# Altium footprint library AMPHENOL_10103594-0001LF.PcbLib: 1 footprints
Each footprint in its own frame and in the unit in brackets; x right, y up, seen from the top. Pads: shape width x height; smd on the part's side, far side on the other; paste and mask are expansions set on the pad; w line width, h text height; cw(c..) or ccw(c..) is an arc to the next point about the centre after c.
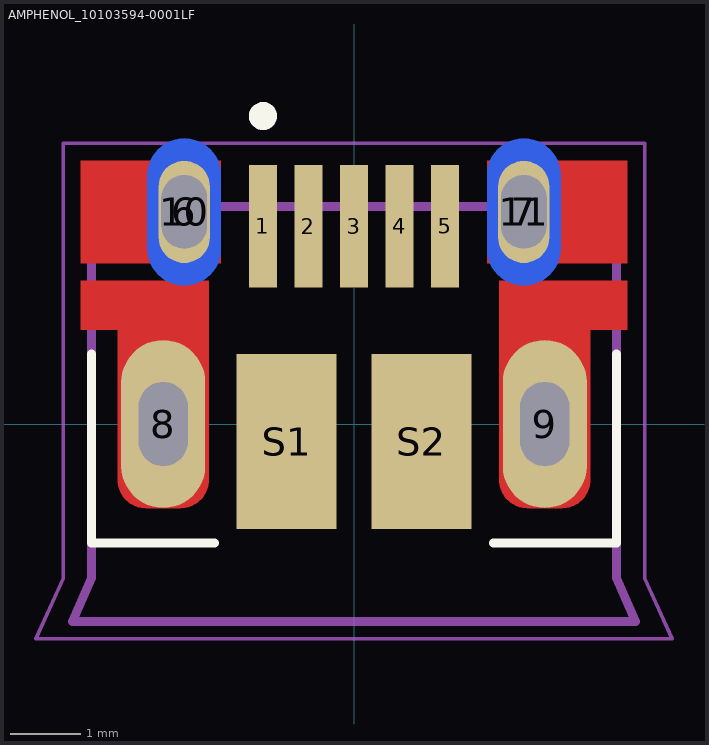
[diagram p0: the footprint, top view; thin cyan lines are the x and y axes]

## AMPHENOL_10103594-0001LF [mm]
height 2.99
pads (13):
  rect 0.4x1.75 smd: 1(-1.3,2.825) 2(-0.65,2.825) 3(0,2.825) 4(0.65,2.825) 5(1.3,2.825)
  oval 0.73x1.46 hole 0.65 slot 1.05 at 90 deg mask+0: 6(-2.425,3.03) 7(2.425,3.03)
  oval 1.2x2.4 hole 0.7 slot 1.2 at 90 deg: 8(-2.725,0) 9(2.725,0)
  oval 1.05x2.1 smd far side paste-2: 10(-2.425,3.03) 11(2.425,3.03)
  rect 1.425x2.5 smd: S1(-0.962,-0.25) S2(0.962,-0.25)
Top Layer:
  region: 3.9,1.35 3.375,1.35 3.375,-0.8 3.374,-0.821 3.373,-0.842 3.37,-0.863 3.366,-0.883 3.361,-0.904 3.355,-0.924 3.348,-0.943 3.34,-0.963 3.331,-0.982 3.321,-1 3.31,-1.018 3.299,-1.035 3.286,-1.052 3.272,-1.068 3.258,-1.083 3.243,-1.097 3.227,-1.111 3.21,-1.124 3.193,-1.135 3.175,-1.146 3.157,-1.156 3.138,-1.165 3.118,-1.173 3.099,-1.18 3.079,-1.186 3.058,-1.191 3.038,-1.195 3.017,-1.198 2.996,-1.199 2.975,-1.2 2.475,-1.2 2.454,-1.199 2.433,-1.198 2.412,-1.195 2.392,-1.191 2.371,-1.186 2.351,-1.18 2.332,-1.173 2.312,-1.165 2.293,-1.156 2.275,-1.146 2.257,-1.135 2.24,-1.124 2.223,-1.111 2.207,-1.097 2.192,-1.083 2.178,-1.068 2.164,-1.052 2.151,-1.035 2.14,-1.018 2.129,-1 2.119,-0.982 2.11,-0.963 2.102,-0.943 2.095,-0.924 2.089,-0.904 2.084,-0.883 2.08,-0.863 2.077,-0.842 2.076,-0.821 2.075,-0.8 2.075,2.05 3.9,2.05
  region: -2.075,-0.8 -2.076,-0.821 -2.077,-0.842 -2.08,-0.863 -2.084,-0.883 -2.089,-0.904 -2.095,-0.924 -2.102,-0.943 -2.11,-0.963 -2.119,-0.982 -2.129,-1 -2.14,-1.018 -2.151,-1.035 -2.164,-1.052 -2.178,-1.068 -2.192,-1.083 -2.207,-1.097 -2.223,-1.111 -2.24,-1.124 -2.257,-1.135 -2.275,-1.146 -2.293,-1.156 -2.312,-1.165 -2.332,-1.173 -2.351,-1.18 -2.371,-1.186 -2.392,-1.191 -2.412,-1.195 -2.433,-1.198 -2.454,-1.199 -2.475,-1.2 -2.975,-1.2 -2.996,-1.199 -3.017,-1.198 -3.038,-1.195 -3.058,-1.191 -3.079,-1.186 -3.099,-1.18 -3.118,-1.173 -3.138,-1.165 -3.157,-1.156 -3.175,-1.146 -3.193,-1.135 -3.21,-1.124 -3.227,-1.111 -3.243,-1.097 -3.258,-1.083 -3.272,-1.068 -3.286,-1.052 -3.299,-1.035 -3.31,-1.018 -3.321,-1 -3.331,-0.982 -3.34,-0.963 -3.348,-0.943 -3.355,-0.924 -3.361,-0.904 -3.366,-0.883 -3.37,-0.863 -3.373,-0.842 -3.374,-0.821 -3.375,-0.8 -3.375,1.35 -3.9,1.35 -3.9,2.05 -2.075,2.05
  region: 3.9,2.3 1.9,2.3 1.9,3.76 3.9,3.76
  region: -1.9,2.3 -3.9,2.3 -3.9,3.76 -1.9,3.76
Top Overlay:
  circle w0.2: c-1.3,4.4 r0.1
  lines w0.127: -3.75,1 -3.75,-1.7 -1.995,-1.7 ; 1.995,-1.7 3.75,-1.7 3.75,1
Top Solder:
  region: 4,1.25 3.475,1.25 3.475,-0.8 3.474,-0.826 3.472,-0.852 3.469,-0.878 3.464,-0.904 3.458,-0.929 3.451,-0.955 3.442,-0.979 3.432,-1.003 3.421,-1.027 3.408,-1.05 3.394,-1.072 3.38,-1.094 3.364,-1.115 3.347,-1.135 3.329,-1.154 3.31,-1.172 3.29,-1.189 3.269,-1.205 3.247,-1.219 3.225,-1.233 3.202,-1.246 3.178,-1.257 3.154,-1.267 3.13,-1.276 3.104,-1.283 3.079,-1.289 3.053,-1.294 3.027,-1.297 3.001,-1.299 2.975,-1.3 2.475,-1.3 2.449,-1.299 2.423,-1.297 2.397,-1.294 2.371,-1.289 2.346,-1.283 2.32,-1.276 2.296,-1.267 2.272,-1.257 2.248,-1.246 2.225,-1.233 2.203,-1.219 2.181,-1.205 2.16,-1.189 2.14,-1.172 2.121,-1.154 2.103,-1.135 2.086,-1.115 2.07,-1.094 2.056,-1.072 2.042,-1.05 2.029,-1.027 2.018,-1.003 2.008,-0.979 1.999,-0.955 1.992,-0.929 1.986,-0.904 1.981,-0.878 1.978,-0.852 1.976,-0.826 1.975,-0.8 1.975,2.15 4,2.15
  region: 4,2.2 1.8,2.2 1.8,3.86 4,3.86
  region: -1.8,2.2 -4,2.2 -4,3.86 -1.8,3.86
  region: -1.975,-0.8 -1.976,-0.826 -1.978,-0.852 -1.981,-0.878 -1.986,-0.904 -1.992,-0.929 -1.999,-0.955 -2.008,-0.979 -2.018,-1.003 -2.029,-1.027 -2.042,-1.05 -2.056,-1.072 -2.07,-1.094 -2.086,-1.115 -2.103,-1.135 -2.121,-1.154 -2.14,-1.172 -2.16,-1.189 -2.181,-1.205 -2.203,-1.219 -2.225,-1.233 -2.248,-1.246 -2.272,-1.257 -2.296,-1.267 -2.32,-1.276 -2.346,-1.283 -2.371,-1.289 -2.397,-1.294 -2.423,-1.297 -2.449,-1.299 -2.475,-1.3 -2.975,-1.3 -3.001,-1.299 -3.027,-1.297 -3.053,-1.294 -3.079,-1.289 -3.104,-1.283 -3.13,-1.276 -3.154,-1.267 -3.178,-1.257 -3.202,-1.246 -3.225,-1.233 -3.247,-1.219 -3.269,-1.205 -3.29,-1.189 -3.31,-1.172 -3.329,-1.154 -3.347,-1.135 -3.364,-1.115 -3.38,-1.094 -3.394,-1.072 -3.408,-1.05 -3.421,-1.027 -3.432,-1.003 -3.442,-0.979 -3.451,-0.955 -3.458,-0.929 -3.464,-0.904 -3.469,-0.878 -3.472,-0.852 -3.474,-0.826 -3.475,-0.8 -3.475,1.25 -4,1.25 -4,2.15 -1.975,2.15
Mechanical 13:
  circle w0.2: c-1.3,4.4 r0.1
  lines w0.127: -4.02,-2.82 4.02,-2.82 3.75,-2.2 3.75,3.11 -3.75,3.11 -3.75,-1.7 -3.75,-2.2 -4.02,-2.82
Mechanical 15:
  lines w0.05: -4.545,-3.07 -4.15,-2.2 -4.15,4.01 4.15,4.01 4.15,-2.2 4.545,-3.07 -4.545,-3.07
3D body "10103594-0001LF--3DModel-STEP-269445.STEP": height 2.89, standoff -0.71, extent -4.02,-2.794 4.02,3.239